# Altium footprint library Biblioteka.PcbLib: 55 footprints (part 1 of 4)
Each footprint in its own frame and in the unit in brackets; x right, y up, seen from the top. Pads: shape width x height; smd on the part's side, far side on the other; paste and mask are expansions set on the pad; w line width, h text height; cw(c..) or ccw(c..) is an arc to the next point about the centre after c.
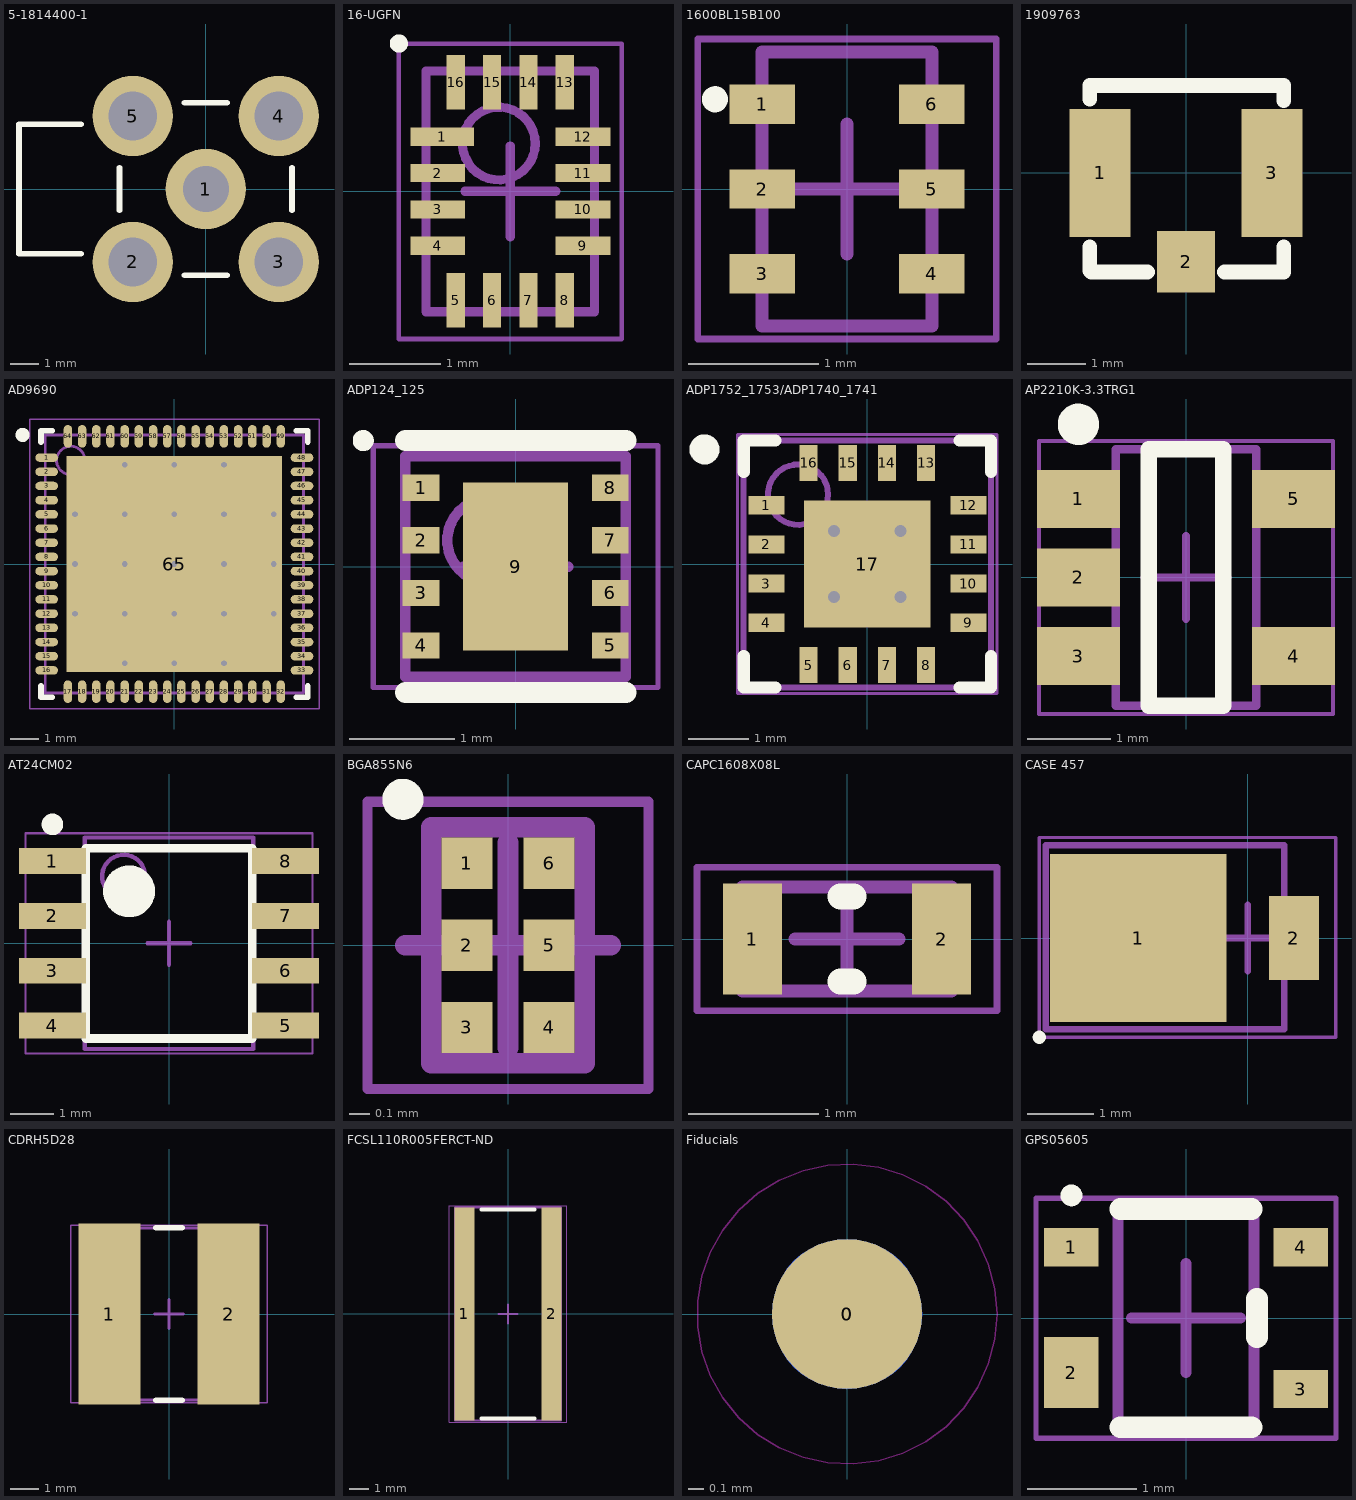
[diagram p0: the footprints below, top view; thin cyan lines are the x and y axes]

## 5-1814400-1 [mm] "SMA Connector Jack, Female Socket 50Ohm Through Hole, Right Angle Solder"
pads (5):
  round 2.8 hole 1.6: 1(0,0)
  round 2.8 hole 1.7: 2(-2.54,-2.54) 3(2.54,-2.54) 4(2.54,2.54) 5(-2.54,2.54)
Top Overlay:
  lines w0.2: -4.34,-2.25 -6.5,-2.25 -6.5,2.25 -4.34,2.25 ; -3,-0.74 -3,0.74 ; -0.74,-3 0.74,-3 ; -0.74,3 0.74,3 ; 3,-0.74 3,0.74

## 16-UGFN [mm] "QFN, 16-Leads, Body 1,80x2,60mm, Pitch 0,40mm, IPC High Density"
height 0.55
pads (16):
  rect 0.7x0.2 smd mask+0.052: 1(-0.75,0.6)
  rect 0.6x0.2 smd mask+0.052: 2(-0.8,0.2) 3(-0.8,-0.2) 4(-0.8,-0.6) 9(0.8,-0.6) 10(0.8,-0.2) 11(0.8,0.2) 12(0.8,0.6)
  rect 0.2x0.6 smd mask+0.052: 5(-0.6,-1.2) 6(-0.2,-1.2) 7(0.2,-1.2) 8(0.6,-1.2) 13(0.6,1.2) 14(0.2,1.2) 15(-0.2,1.2) 16(-0.6,1.2)
Top Overlay:
  circle w0.1: c-1.225,1.625 r0.05
Mechanical 13:
  circle w0.1: c-0.125,0.525 r0.4
  lines w0.1: -0.925,-1.325 0.925,-1.325 0.925,1.325 -0.925,1.325 -0.925,-1.325
Mechanical 15:
  lines w0.05: -1.225,-1.625 1.225,-1.625 1.225,1.625 -1.225,1.625 -1.225,-1.625
  lines w0.1: -0.5,0 0.5,0 ; 0,-0.5 0,0.5
3D body "16-UGFN.step": height 0.55, standoff 0, extent -0.975,-1.375 0.975,1.375

## 1600BL15B100 [mm] "1.7GHz 1:2 Ratio RF Balun, EIA 0805 SMD"
height 0.95
pads (6):
  rect 0.5x0.3 smd: 1(-0.65,0.65) 2(-0.65,0) 3(-0.65,-0.65) 4(0.65,-0.65) 5(0.65,0) 6(0.65,0.65)
Top Overlay:
  circle w0.1: c-1.012,0.688 r0.05
Mechanical 13:
  lines w0.1: -0.65,-1.05 -0.65,1.05 0.65,1.05 0.65,-1.05 -0.65,-1.05
Mechanical 15:
  lines w0.05: -1.145,-1.15 -1.145,1.15 1.145,1.15 1.145,-1.15 -1.145,-1.15
  lines w0.1: -0.5,0 0.5,0 ; 0,-0.5 0,0.5
3D body "1600BL15B100.step": height 0.95, standoff 0, extent -0.725,-1.05 0.725,1.05

## 1909763 [mm] "U.FL (UMCC) Connector Jack, Male Pin 50Ohm Surface Mount Solder"
pads (3):
  rect 1.05x2.2 smd: 1(-1.475,0) 3(1.475,0)
  rect 1x1.05 smd: 2(0,-1.525)
Top Overlay:
  lines w0.254: -1.651,-1.27 -1.651,-1.676 -1.626,-1.702 -1.475,-1.702 -0.66,-1.702 ; -1.651,1.27 -1.651,1.499 1.676,1.499 1.676,1.245 ; 0.66,-1.702 1.676,-1.702 1.676,-1.27
3D body "User Library-1909763-1.STEP": height 1, standoff -0.28, extent -1.475,-1.555 1.525,1.295

## AD9690 [mm] "AD9690 9 x 9mm, 64 pin, 0.5 pitch 7.6sq Pad"
height 0.8
pads (81):
  oval 0.8x0.3 smd: 1(-4.5,3.75) 2(-4.5,3.25) 3(-4.5,2.75) 4(-4.5,2.25) 5(-4.5,1.75) 6(-4.5,1.25) 7(-4.5,0.75) 8(-4.5,0.25) 9(-4.5,-0.25) 10(-4.5,-0.75) 11(-4.5,-1.25) 12(-4.5,-1.75) 13(-4.5,-2.25) 14(-4.5,-2.75) 15(-4.5,-3.25) 16(-4.5,-3.75) 33(4.5,-3.75) 34(4.5,-3.25) 35(4.5,-2.75) 36(4.5,-2.25) 37(4.5,-1.75) 38(4.5,-1.25) 39(4.5,-0.75) 40(4.5,-0.25) 41(4.5,0.25) 42(4.5,0.75) 43(4.5,1.25) 44(4.5,1.75) 45(4.5,2.25) 46(4.5,2.75) 47(4.5,3.25) 48(4.5,3.75)
  oval 0.3x0.8 smd: 17(-3.75,-4.5) 18(-3.25,-4.5) 19(-2.75,-4.5) 20(-2.25,-4.5) 21(-1.75,-4.5) 22(-1.25,-4.5) 23(-0.75,-4.5) 24(-0.25,-4.5) 25(0.25,-4.5) 26(0.75,-4.5) 27(1.25,-4.5) 28(1.75,-4.5) 29(2.25,-4.5) 30(2.75,-4.5) 31(3.25,-4.5) 32(3.75,-4.5) 49(3.75,4.5) 50(3.25,4.5) 51(2.75,4.5) 52(2.25,4.5) 53(1.75,4.5) 54(1.25,4.5) 55(0.75,4.5) 56(0.25,4.5) 57(-0.25,4.5) 58(-0.75,4.5) 59(-1.25,4.5) 60(-1.75,4.5) 61(-2.25,4.5) 62(-2.75,4.5) 63(-3.25,4.5) 64(-3.75,4.5)
  rect 7.6x7.6 smd paste-5: 65(0,0)
  rect 1.5x1.5 on Top Paste: ""(-2.625,-2.625) ""(-2.625,-0.875) ""(-2.625,0.875) ""(-2.625,2.625) ""(-0.875,-2.625) ""(-0.875,-0.875) ""(-0.875,0.875) ""(-0.875,2.625) ""(0.875,-2.625) ""(0.875,-0.875) ""(0.875,0.875) ""(0.875,2.625) ""(2.625,-2.625) ""(2.625,-0.875) ""(2.625,0.875) ""(2.625,2.625)
via 1.75,-1.75 diameter 0.5 hole 0.2
via 3.5,-1.75 diameter 0.5 hole 0.2
via -3.5,1.75 diameter 0.5 hole 0.2
via -1.75,1.75 diameter 0.5 hole 0.2
via 1.75,1.75 diameter 0.5 hole 0.2
via -1.75,3.5 diameter 0.5 hole 0.2
via 1.75,0 diameter 0.5 hole 0.2
via -1.75,0 diameter 0.5 hole 0.2
via 3.5,0 diameter 0.5 hole 0.2
via 0,1.75 diameter 0.5 hole 0.2
via 0,-3.5 diameter 0.5 hole 0.2
via -1.75,-3.5 diameter 0.5 hole 0.2
via 0,-1.75 diameter 0.5 hole 0.2
via 1.75,3.5 diameter 0.5 hole 0.2
via 0,0 diameter 0.5 hole 0.2
via 0,3.5 diameter 0.5 hole 0.2
via -3.5,0 diameter 0.5 hole 0.2
via 3.5,1.75 diameter 0.5 hole 0.2
via -3.5,-1.75 diameter 0.5 hole 0.2
via -1.75,-1.75 diameter 0.5 hole 0.2
via 1.75,-3.5 diameter 0.5 hole 0.2
Top Overlay:
  circle w0.25: c-5.35,4.55 r0.125
  lines w0.2: -4.7,-4.3 -4.7,-4.7 -4.3,-4.7 ; -4.7,4.3 -4.7,4.7 -4.3,4.7 ; 4.3,-4.7 4.7,-4.7 4.7,-4.3 ; 4.3,4.7 4.7,4.7 4.7,4.3
Mechanical 13:
  circle w0.1: c-3.65,3.65 r0.5
  lines w0.1: -4.55,-4.55 -4.55,4.55 4.55,4.55 4.55,-4.55 -4.55,-4.55
Mechanical 15:
  lines w0.05: -5.1,-5.1 -5.1,5.1 5.1,5.1 5.1,-5.1 -5.1,-5.1
  lines w0.1: -0.5,-0.045 0.5,-0.045 ; 0,-0.545 0,0.455
3D body "AD9690.step": height 0.8, standoff 0, extent -4.57,-4.57 4.57,4.57

## ADP124_125 [mm] "8-Lead Lead Frame Chip Scale Package [LFCSP_UD]  2 mm × 2 mm Body, Ultra Thin, Dual Lead  (CP-8-10)"
height 0.55
pads (9):
  rect 0.35x0.25 smd: 1(-0.9,0.75) 2(-0.9,0.25) 3(-0.9,-0.25) 4(-0.9,-0.75) 5(0.9,-0.75) 6(0.9,-0.25) 7(0.9,0.25) 8(0.9,0.75)
  rect 1x1.6 smd: 9(0,0)
Top Overlay:
  circle w0.1: c-1.45,1.2 r0.05
  lines w0.2: -1.05,-1.2 1.05,-1.2 ; -1.05,1.2 1.05,1.2
Mechanical 13:
  circle w0.1: c-0.25,0.25 r0.4
  lines w0.1: -1.05,-1.05 1.05,-1.05 1.05,1.05 -1.05,1.05 -1.05,-1.05
Mechanical 15:
  lines w0.05: -1.355,-1.15 1.355,-1.15 1.355,1.15 -1.355,1.15 -1.355,-1.15
  lines w0.1: -0.5,0 0.5,0 ; 0,-0.5 0,0.5
3D body "ADP124_125.step": height 0.55, standoff 0, extent -1.15,-1.05 1.15,1.05

## ADP1752_1753/ADP1740_1741 [mm] "16-Lead Lead Frame Chip Scale Package [LFCSP_WQ]  4 mm × 4 mm Body, Very Very Thin Quad  (CP-16-23)"
height 0.8
pads (17):
  rect 0.6x0.3 smd: 1(-1.675,0.975) 2(-1.675,0.325) 3(-1.675,-0.325) 4(-1.675,-0.975) 9(1.675,-0.975) 10(1.675,-0.325) 11(1.675,0.325) 12(1.675,0.975)
  rect 0.3x0.6 smd: 5(-0.975,-1.675) 6(-0.325,-1.675) 7(0.325,-1.675) 8(0.975,-1.675) 13(0.975,1.675) 14(0.325,1.675) 15(-0.325,1.675) 16(-0.975,1.675)
  rect 2.1x2.1 smd: 17(0,0)
via -0.55,0.55 diameter 0.5 hole 0.2
via 0.55,0.55 diameter 0.5 hole 0.2
via -0.55,-0.55 diameter 0.5 hole 0.2
via 0.55,-0.55 diameter 0.5 hole 0.2
Top Overlay:
  circle w0.25: c-2.7,1.9 r0.125
  lines w0.2: -2.05,-1.525 -2.05,-2.05 -1.525,-2.05 ; -2.05,1.525 -2.05,2.05 -1.525,2.05 ; 1.525,-2.05 2.05,-2.05 2.05,-1.525 ; 1.525,2.05 2.05,2.05 2.05,1.525
Mechanical 13:
  circle w0.1: c-1.15,1.15 r0.5
  lines w0.1: -2.05,-2.05 -2.05,2.05 2.05,2.05 2.05,-2.05 -2.05,-2.05
Mechanical 15:
  lines w0.05: -2.15,-2.15 -2.15,2.15 2.15,2.15 2.15,-2.15 -2.15,-2.15
  lines w0.1: -0.5,0 0.5,0 ; 0,-0.5 0,0.5
3D body "ADP1752_1753.step": height 0.8, standoff 0, extent -2.05,-2.05 2.05,2.05

## AP2210K-3.3TRG1 [mm] "SOT23, 5-Leads, Body 2.96x2.83mm, Pitch 0.95mm, IPC High Density"
height 1.45
pads (5):
  rect 1x0.7 smd: 1(-1.3,0.95) 2(-1.3,0) 3(-1.3,-0.95) 4(1.3,-0.95) 5(1.3,0.95)
Top Overlay:
  circle w0.25: c-1.3,1.85 r0.125
  lines w0.2: -0.45,-1.55 0.45,-1.55 0.45,1.55 -0.45,1.55 -0.45,-1.55
Mechanical 13:
  lines w0.1: -0.85,-1.55 -0.85,1.55 0.85,1.55 0.85,-1.55 -0.85,-1.55
Mechanical 15:
  lines w0.05: -1.775,-1.65 -1.775,1.65 1.775,1.65 1.775,-1.65 -1.775,-1.65
  lines w0.1: -0.5,0 0.5,0 ; 0,-0.5 0,0.5
3D body "AP2210K-3.3TRG1.step": height 1.45, standoff 0, extent -1.5,-1.55 1.5,1.55

## AT24CM02 [mm]
pads (8):
  rect 1.55x0.6 smd: 1(-2.7,1.905) 2(-2.7,0.635) 3(-2.7,-0.635) 4(-2.7,-1.905) 5(2.7,-1.905) 6(2.7,-0.635) 7(2.7,0.635) 8(2.7,1.905)
Top Overlay:
  circle w0.25: c-2.7,2.755 r0.125
  circle w0.6: c-0.925,1.205 r0.3
  lines w0.2: -1.925,-2.205 -1.925,2.205 1.925,2.205 1.925,-2.205 -1.925,-2.205
Mechanical 13:
  circle w0.1: c-1.05,1.55 r0.5
  lines w0.1: -1.95,-2.45 -1.95,2.45 1.95,2.45 1.95,-2.45 -1.95,-2.45
Mechanical 15:
  lines w0.05: -3.325,-2.55 -3.325,2.55 3.325,2.55 3.325,-2.55 -3.325,-2.55
  lines w0.1: -0.5,0 0.5,0 ; 0,-0.5 0,0.5
3D body "AT24CM02.step": height 1.75, standoff 0, extent -3,-2.45 3,2.45

## BGA855N6 [mm] "TSNP-6-10 leadless package (footprint: 0.7 x 1.1 mm2"
height 0.4
pads (6):
  rect 0.25x0.25 smd: 1(-0.2,0.4) 2(-0.2,0) 3(-0.2,-0.4) 4(0.2,-0.4) 5(0.2,0) 6(0.2,0.4)
Top Overlay:
  circle w0.1: c-0.512,0.712 r0.05
Mechanical 13:
  lines w0.1: -0.375,-0.575 -0.375,0.575 0.375,0.575 0.375,-0.575 -0.375,-0.575
Mechanical 15:
  lines w0.05: -0.685,-0.7 -0.685,0.7 0.685,0.7 0.685,-0.7 -0.685,-0.7
  lines w0.1: -0.5,0 0.5,0 ; 0,-0.5 0,0.5
3D body "BGA855N6.step": height 0.4, standoff 0.02, extent -0.375,-0.575 0.375,0.575

## CAPC1608X08L [mm] "Chip Capacitor, 2-Leads, Body 1,60x0,80mm, IPC High Density"
height 0.8
pads (2):
  rect 0.45x0.85 smd: 1(-0.725,0) 2(0.725,0)
Top Overlay:
  lines w0.2: -0.05,-0.325 0.05,-0.325 ; -0.05,0.325 0.05,0.325
Mechanical 13:
  lines w0.1: -0.8,-0.4 -0.8,0.4 0.8,0.4 0.8,-0.4 -0.8,-0.4
Mechanical 15:
  lines w0.05: -1.15,-0.55 -1.15,0.55 1.15,0.55 1.15,-0.55 -1.15,-0.55
  lines w0.1: -0.4,0 0.4,0 ; 0,-0.4 0,0.4
3D body "CAPC1608X08L.step": height 0.8, standoff 0, extent -0.8,-0.4 0.8,0.4

## CASE 457 [mil] "CASE 457-04, MBRM140T1G"
height 39.37
pads (2):
  rect 105.12x100 smd: 1(-65.06,0)
  rect 30x50 smd: 2(27.5,0)
Top Overlay:
  circle w3.94: c-124.02,-59.06 r1.97
Mechanical 13:
  lines w3.94: -120.08,-54.33 -120.08,55.12 21.65,55.12 21.65,-54.33 -120.08,-54.33
Mechanical 15:
  lines w1.97: -124.02,-59.06 -124.02,59.84 52.36,59.84 52.36,-59.06 -124.02,-59.06
  lines w3.94: -19.68,0 19.68,0 ; 0,-19.68 0,19.68
3D body: height 43.31, standoff 0, extent -118.11,-51.97 27.17,53.15

## CDRH5D28 [mm] "CDRH5D28 , Precision Wire Wound Inductor, 2-Leads, Body 6,00x6,00mm, IPC High Density"
height 3
pads (2):
  rect 2.15x6.3 smd: 1(-2.075,0) 2(2.075,0)
Top Overlay:
  lines w0.2: -0.45,-3 0.45,-3 ; -0.45,3 0.45,3
Mechanical 13:
  lines w0.1: -3,-3 3,-3 3,3 -3,3 -3,-3
Mechanical 15:
  lines w0.05: -3.425,-3.1 3.425,-3.1 3.425,3.1 -3.425,3.1 -3.425,-3.1
  lines w0.1: -0.5,0 0.5,0 ; 0,-0.5 0,0.5
3D body "CDRH5D28 .step": height 3.1, standoff 0, extent -3.1,-3.15 3.1,3.15

## FCSL110R005FERCT-ND [mm] "Wide 4320 (11050 Metric), 2043"
height 0.8
pads (2):
  rect 1.05x11.2 smd: 1(-2.3,0) 2(2.3,0)
Top Overlay:
  lines w0.2: -1.4,-5.5 1.4,-5.5 ; -1.4,5.5 1.4,5.5
Mechanical 13:
  lines w0.1: -2.8,-5.6 -2.8,5.6 2.8,5.6 2.8,-5.6 -2.8,-5.6
Mechanical 15:
  lines w0.05: -3.1,-5.7 -3.1,5.7 3.1,5.7 3.1,-5.7 -3.1,-5.7
  lines w0.1: -0.5,0 0.5,0 ; 0,-0.5 0,0.5
3D body "FCSL110R005FERCT-ND .step": height 0.8, standoff 0, extent -2.8,-5.6 2.8,5.6

## Fiducials [mm]
pads (2):
  round 1 smd paste-10 mask+0.5: 0(0,0)
  round 1 smd far side paste-10 mask+0.5: 0(0,0)
Keep-Out Layer:
  circle w0.01: c0,0 r1

## GPS05605 [mm] "SOT343, 4-Leads, Body 2,00x2,15mm, Pitch 1,30mm, IPC High Density"
height 0.9
pads (4):
  rect 0.5x0.35 smd: 1(-1.05,0.65) 3(1.05,-0.65) 4(1.05,0.65)
  rect 0.5x0.65 smd: 2(-1.05,-0.5)
Top Overlay:
  circle w0.1: c-1.05,1.125 r0.05
  lines w0.2: -0.6,-1 0.6,-1 ; -0.6,1 0.6,1 ; 0.65,-0.175 0.65,0.175
Mechanical 13:
  lines w0.1: -0.625,-1 -0.625,1 0.625,1 0.625,-1 -0.625,-1
Mechanical 15:
  lines w0.05: -1.375,-1.1 -1.375,1.1 1.375,1.1 1.375,-1.1 -1.375,-1.1
  lines w0.1: -0.5,0 0.5,0 ; 0,-0.5 0,0.5
3D body "GPS05605.step": height 0.9, standoff 0, extent -1.225,-1 1.225,1